# Altium footprint library conn.PcbLib: 101 footprints (part 2 of 7)
Each footprint in its own frame and in the unit in brackets; x right, y up, seen from the top. Pads: shape width x height; smd on the part's side, far side on the other; paste and mask are expansions set on the pad; w line width, h text height; cw(c..) or ccw(c..) is an arc to the next point about the centre after c.
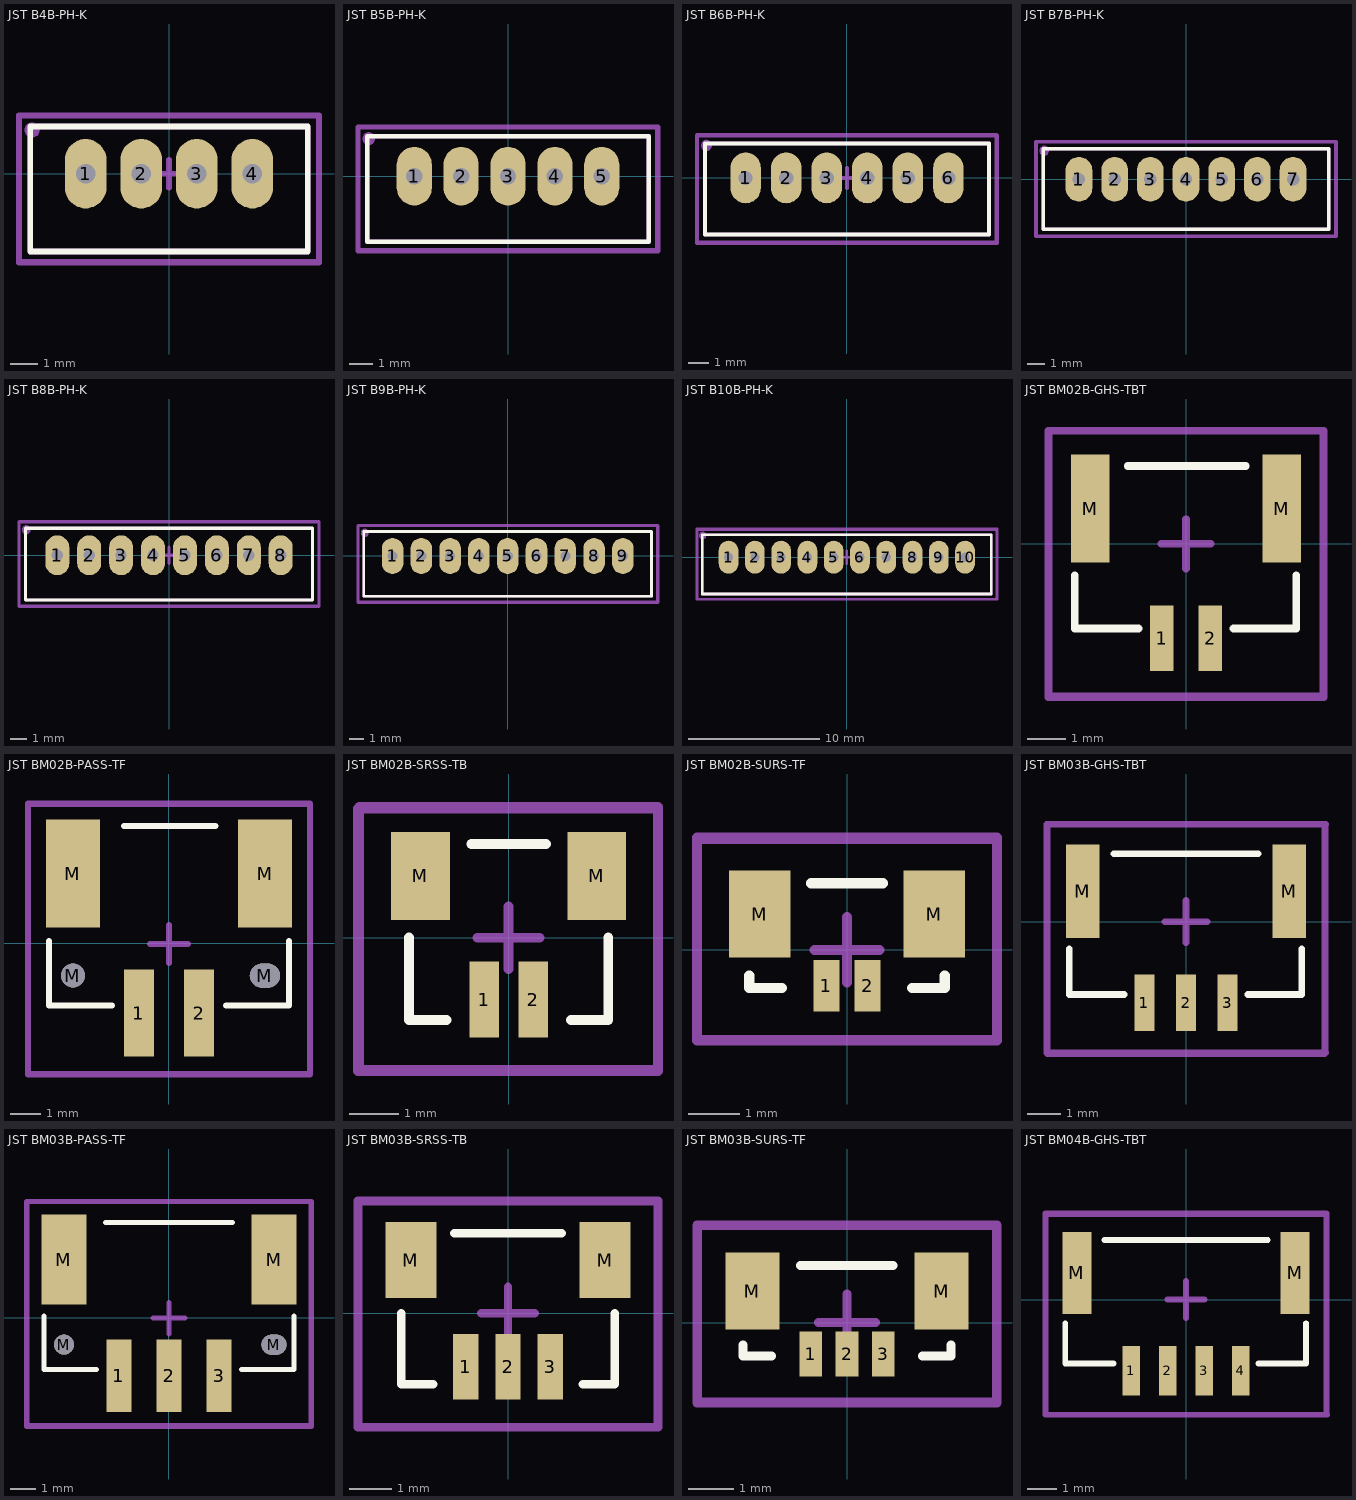
[diagram p1: the footprints below, top view; thin cyan lines are the x and y axes]

## JST B4B-PH-K [mm]
height 6
pads (4):
  oval 1.5x2.5 hole 0.7: 1(-3,0) 2(-1,0) 3(1,0) 4(3,0)
Top Overlay:
  lines w0.2: -5,-2.8 -5,1.7 5,1.7 5,-2.8 -5,-2.8
Bottom Overlay:
  circle w0.254: c-4.1,1.1 r0.141
Mechanical 13:
  lines w0.2: -5,-2.8 5,-2.8 5,1.7 -5,1.7 -5,-2.8
Top Component:
  circle w0.051: c-4.928,1.575 r0.25
  region: -4.928,1.325 -4.977,1.325 -5.069,1.363 -5.14,1.433 -5.178,1.525 -5.178,1.575 -5.178,1.625 -5.14,1.717 -5.069,1.787 -4.977,1.825 -4.928,1.825 -4.878,1.825 -4.786,1.787 -4.716,1.717 -4.677,1.625 -4.677,1.575 -4.677,1.525 -4.716,1.433 -4.786,1.363 -4.878,1.325
  lines w0.203: -5.385,-3.175 -5.385,2.083 5.385,2.083 5.385,-3.175 -5.385,-3.175
  text ".Designator" at -0.813,-0.559 h2.03
Component Center:
  lines w0.2: -0.5,0 0.5,0 ; 0,-0.5 0,0.5 ; -5.4,-3.2 -5.4,2.1 5.4,2.1 5.4,-3.2 -5.4,-3.2
3D body "JST B4B-PH-K-S.STEP": height 6, standoff -3.4, extent -4.95,-2.8 4.95,1.7

## JST B5B-PH-K [mm]
height 6
pads (5):
  oval 1.5x2.5 hole 0.7: 1(-4,0) 2(-2,0) 3(0,0) 4(2,0) 5(4,0)
Top Overlay:
  lines w0.2: -6,-2.8 -6,1.7 6,1.7 6,-2.8 -6,-2.8
Bottom Overlay:
  circle w0.254: c-5.1,1.1 r0.141
Mechanical 13:
  lines w0.2: -6,-2.8 6,-2.8 6,1.7 -6,1.7 -6,-2.8
Top Component:
  circle w0.051: c-5.944,1.6 r0.25
  region: -5.944,1.35 -5.993,1.35 -6.085,1.388 -6.156,1.458 -6.194,1.55 -6.194,1.6 -6.194,1.65 -6.156,1.742 -6.085,1.812 -5.993,1.85 -5.944,1.85 -5.894,1.85 -5.802,1.812 -5.732,1.742 -5.693,1.65 -5.693,1.6 -5.693,1.55 -5.732,1.458 -5.802,1.388 -5.894,1.35
  lines w0.203: -6.401,-3.175 -6.401,2.108 6.375,2.108 6.375,-3.175 -6.401,-3.175
  text ".Designator" at -0.813,-0.584 h2.03
Component Center:
  lines w0.2: -0.5,0 0.5,0 ; 0,-0.5 0,0.5 ; -6.4,-3.2 -6.4,2.1 6.4,2.1 6.4,-3.2 -6.4,-3.2
3D body "JST B5B-PH-K-S.STEP": height 6, standoff -3.4, extent -5.95,-2.8 5.95,1.7

## JST B6B-PH-K [mm]
height 6
pads (6):
  oval 1.5x2.5 hole 0.7: 1(-5,0) 2(-3,0) 3(-1,0) 4(1,0) 5(3,0) 6(5,0)
Top Overlay:
  lines w0.2: -7,-2.8 7,-2.8 7,1.7 -7,1.7 -7,-2.8
Bottom Overlay:
  circle w0.254: c-6.1,1.1 r0.141
Mechanical 13:
  lines w0.2: 6.95,-2.8 -7,-2.8 -7,1.7 7,1.7 7,-2.8
Top Component:
  circle w0.051: c-6.934,1.6 r0.25
  region: -6.934,1.35 -6.984,1.35 -7.076,1.388 -7.146,1.458 -7.184,1.55 -7.184,1.6 -7.184,1.65 -7.146,1.742 -7.076,1.812 -6.984,1.85 -6.934,1.85 -6.884,1.85 -6.792,1.812 -6.722,1.742 -6.684,1.65 -6.684,1.6 -6.684,1.55 -6.722,1.458 -6.792,1.388 -6.884,1.35
  lines w0.203: -7.391,-3.2 -7.391,2.108 7.366,2.108 7.366,-3.2 -7.391,-3.2
  text ".Designator" at -0.813,-0.559 h2.03
Component Center:
  lines w0.2: -0.5,0 0.5,0 ; 0,-0.5 0,0.5 ; -7.4,-3.2 -7.4,2.1 7.4,2.1 7.4,-3.2 -7.4,-3.2
3D body "JST B6B-PH-K-S.STEP": height 6, standoff -3.4, extent -6.95,-2.8 6.95,1.7

## JST B7B-PH-K [mm]
height 6
pads (7):
  oval 1.5x2.5 hole 0.7: 1(-6,0) 2(-4,0) 3(-2,0) 4(0,0) 5(2,0) 6(4,0) 7(6,0)
Top Overlay:
  lines w0.2: -8,-2.8 -8,1.7 8,1.7 8,-2.8 -8,-2.8
Bottom Overlay:
  circle w0.254: c-7.1,1.1 r0.141
Mechanical 13:
  lines w0.2: -8,-2.8 8,-2.8 8,1.7 -8,1.7 -8,-2.8
Top Component:
  circle w0.051: c-7.95,1.6 r0.25
  region: -7.95,1.35 -8,1.35 -8.092,1.388 -8.162,1.458 -8.2,1.55 -8.2,1.6 -8.2,1.65 -8.162,1.742 -8.092,1.812 -8,1.85 -7.95,1.85 -7.9,1.85 -7.808,1.812 -7.738,1.742 -7.7,1.65 -7.7,1.6 -7.7,1.55 -7.738,1.458 -7.808,1.388 -7.9,1.35
  lines w0.203: -8.407,-3.2 8.407,-3.2 8.407,2.108 -8.407,2.108 -8.407,-3.2
  text ".Designator" at -0.813,-0.584 h2.03
Component Center:
  lines w0.2: -0.5,0 0.5,0 ; 0,-0.5 0,0.5 ; -8.4,-3.2 8.4,-3.2 8.4,2.1 -8.4,2.1 -8.4,-3.2
3D body "JST B7B-PH-K-S.STEP": height 6, standoff -3.4, extent -7.95,-2.8 7.95,1.7

## JST B8B-PH-K [mm]
height 6
pads (8):
  oval 1.5x2.5 hole 0.7: 1(-7,0) 2(-5,0) 3(-3,0) 4(-1,0) 5(1,0) 6(3,0) 7(5,0) 8(7,0)
Top Overlay:
  lines w0.2: -9,-2.8 9,-2.8 9,1.7 -9,1.7 -9,-2.8
Bottom Overlay:
  circle w0.254: c-8.1,1.1 r0.141
Mechanical 13:
  lines w0.2: 8.95,1.7 -9,1.7 -9,-2.8 9,-2.8 9,1.7
Top Component:
  circle w0.051: c-8.941,1.6 r0.25
  region: -8.941,1.35 -8.991,1.35 -9.083,1.388 -9.153,1.458 -9.191,1.55 -9.191,1.6 -9.191,1.65 -9.153,1.742 -9.083,1.812 -8.991,1.85 -8.941,1.85 -8.891,1.85 -8.799,1.812 -8.729,1.742 -8.691,1.65 -8.691,1.6 -8.691,1.55 -8.729,1.458 -8.799,1.388 -8.891,1.35
  lines w0.203: -9.398,-3.2 9.398,-3.2 9.398,2.108 -9.398,2.108 -9.398,-3.2
  text ".Designator" at -0.813,-0.559 h2.03
Component Center:
  lines w0.2: -0.5,0 0.5,0 ; 0,-0.5 0,0.5 ; -9.4,-3.2 9.4,-3.2 9.4,2.1 -9.4,2.1 -9.4,-3.2
3D body "JST B8B-PH-K-S.STEP": height 6, standoff -3.4, extent -8.95,-2.8 8.95,1.7

## JST B9B-PH-K [mm]
height 6
pads (9):
  oval 1.5x2.5 hole 0.7: 1(-8,0) 2(-6,0) 3(-4,0) 4(-2,0) 5(0,0) 6(2,0) 7(4,0) 8(6,0) 9(8,0)
Top Overlay:
  lines w0.2: -10,-2.8 -10,1.7 10,1.7 10,-2.8 -10,-2.8
Bottom Overlay:
  circle w0.254: c-9.1,1.1 r0.141
Mechanical 13:
  lines w0.2: -10,-2.8 10,-2.8 10,1.7 -10,1.7 -10,-2.8
Top Component:
  circle w0.051: c-9.931,1.6 r0.25
  region: -9.931,1.35 -9.981,1.35 -10.073,1.388 -10.143,1.458 -10.182,1.55 -10.182,1.6 -10.182,1.65 -10.143,1.742 -10.073,1.812 -9.981,1.85 -9.931,1.85 -9.882,1.85 -9.79,1.812 -9.719,1.742 -9.681,1.65 -9.681,1.6 -9.681,1.55 -9.719,1.458 -9.79,1.388 -9.882,1.35
  lines w0.203: -10.389,-3.226 -10.389,2.108 10.439,2.108 10.439,-3.226 -10.389,-3.226
  text ".Designator" at -0.813,-0.559 h2.03
Component Center:
  lines w0.2: -0.5,0 0.5,0 ; 0,-0.5 0,0.5 ; -10.4,-3.2 10.4,-3.2 10.4,2.1 -10.4,2.1 -10.4,-3.2
3D body "JST B9B-PH-K-S.STEP": height 6, standoff -3.4, extent -9.95,-2.8 9.95,1.7

## JST B10B-PH-K [mm]
height 6
pads (10):
  oval 1.5x2.5 hole 0.7: 1(-9,0) 2(-7,0) 3(-5,0) 4(-3,0) 5(-1,0) 6(1,0) 7(3,0) 8(5,0) 9(7,0) 10(9,0)
Top Overlay:
  lines w0.2: -11,-2.8 -11,1.7 11,1.7 11,-2.8 -11,-2.8
Bottom Overlay:
  circle w0.254: c-10.1,1.1 r0.141
Mechanical 13:
  lines w0.2: 10.95,-2.8 -11,-2.8 -11,1.7 11,1.7 11,-2.8
Top Component:
  circle w0.051: c-10.973,1.651 r0.25
  region: -10.973,1.401 -11.023,1.401 -11.115,1.439 -11.185,1.509 -11.223,1.601 -11.223,1.651 -11.223,1.701 -11.185,1.793 -11.115,1.863 -11.023,1.901 -10.973,1.901 -10.923,1.901 -10.831,1.863 -10.761,1.793 -10.723,1.701 -10.723,1.651 -10.723,1.601 -10.761,1.509 -10.831,1.439 -10.923,1.401
  lines w0.203: -11.405,-3.2 11.43,-3.2 11.43,2.159 -11.405,2.159 -11.405,-3.2
  text ".Designator" at -0.813,-0.559 h2.03
Component Center:
  lines w0.2: -0.5,0 0.5,0 ; 0,-0.5 0,0.5 ; -11.4,-3.2 -11.4,2.1 11.4,2.1 11.4,-3.2 -11.4,-3.2
3D body "JST B10B-PH-K-S.STEP": height 6, standoff -3.4, extent -10.95,-2.8 10.95,1.7

## JST BM02B-GHS-TBT [mm] "JST GH Series 1.25mm pitch, 4 pin top entry connector"
height 4.5
pads (4):
  rect 0.6x1.7 smd: 1(-0.625,-2.437) 2(0.625,-2.437)
  rect 1x2.8 smd: M(-2.475,0.913) M(2.475,0.913)
Top Overlay:
  lines w0.2: -2.875,-0.812 -2.875,-2.187 -1.225,-2.187 ; -1.504,2.008 1.544,2.008 ; 1.225,-2.187 2.85,-2.187 2.85,-0.812
Top Component:
  lines w0.203: -3.556,-3.962 3.556,-3.962 3.556,2.921 -3.556,2.921 -3.556,-3.962
  text ".Designator" at -0.813,-0.559 h2.03
Component Center:
  lines w0.2: -0.635,0 0.635,0 ; 0,-0.635 0,0.635 ; -3.556,-3.937 -3.556,2.921 3.556,2.921 3.556,-3.937 -3.556,-3.937
3D body "JST BM02B-GHS-TBT.STEP": height 4.18, standoff -0.03, extent -2.875,-2.987 2.875,1.963

## JST BM02B-PASS-TF [mm] "JST PA Series 2mm pitch, top entry connector"
height 11.1
pads (6):
  rect 1x2.9 smd: 1(-1,-2.325) 2(1,-2.325)
  round 0.8 hole 0.8 unplated mask+0.102: M(-3.2,-1.075)
  rect 1.8x3.6 smd: M(-3.2,2.325) M(3.2,2.325)
  oval 1x0.8 hole 0.8 slot 1 at 0 deg unplated mask+0.102: M(3.2,-1.075)
Top Overlay:
  lines w0.2: -4,0.075 -4,-2.075 -1.905,-2.075 ; -1.504,3.92 1.544,3.92 ; 1.905,-2.075 4,-2.075 4,0.075
Top Component:
  lines w0.203: -4.699,-4.369 -4.699,4.648 4.699,4.648 4.699,-4.369 -4.699,-4.369
  text ".Designator" at -0.813,-0.559 h2.03
Component Center:
  lines w0.2: -0.635,-0.015 0.635,-0.015 ; 0,-0.65 0,0.62 ; -4.699,-4.357 -4.699,4.66 4.699,4.66 4.699,-4.357 -4.699,-4.357
3D body "JST BM02B-PASS-TF.STEP": height 9, standoff 0, extent -4,-3.225 4,3.875

## JST BM02B-SRSS-TB [mm] "1.0mm pitch/Disconnectable Crimp style connector"
height 2.95
pads (4):
  rect 0.6x1.55 smd: 1(-0.5,-1.262) 2(0.5,-1.262)
  rect 1.2x1.8 smd: M(-1.8,1.262) M(1.8,1.262)
Top Overlay:
  lines w0.2: -2.032,0.008 -2.032,-1.676 -1.27,-1.676 ; -0.762,1.913 0.762,1.913 ; 1.27,-1.676 2.032,-1.676 2.032,0.008
Top Component:
  lines w0.203: -3.073,-2.718 3.048,-2.718 3.048,2.642 -3.073,2.642 -3.073,-2.718
  text ".Designator" at -0.813,-0.559 h2.03
Component Center:
  lines w0.2: -0.635,0 0.635,0 ; 0,-0.635 0,0.635 ; -3.048,-2.692 -3.048,2.667 3.048,2.667 3.048,-2.692 -3.048,-2.692
3D body "JST BM02B-SRSS-TB.STEP": height 4.32, standoff 0, extent -2,-1.687 2,1.913

## JST BM02B-SURS-TF [mm] "1.0mm pitch/Disconnectable Crimp style connector"
height 3.95
pads (4):
  rect 0.5x1 smd: 1(-0.4,-0.7) 2(0.4,-0.7)
  rect 1.2x1.7 smd: M(-1.7,0.7) M(1.7,0.7)
Top Overlay:
  lines w0.2: -1.905,-0.5 -1.905,-0.741 -1.27,-0.741 ; -0.7,1.3 0.7,1.3 ; 1.27,-0.741 1.905,-0.741 1.905,-0.5
Top Component:
  lines w0.203: -2.921,-1.753 -2.921,2.184 2.921,2.184 2.921,-1.753 -2.921,-1.753
  text ".Designator" at -0.813,-0.559 h2.03
Component Center:
  lines w0.2: -0.635,0 0.635,0 ; 0,-0.635 0,0.635 ; -2.921,-1.757 -2.921,2.159 2.921,2.159 2.921,-1.757 -2.921,-1.757
3D body "JST BM02B-SURS-TF.STEP": height 2.75, standoff 0, extent -1.9,-0.995 1.9,1.255

## JST BM03B-GHS-TBT [mm] "JST GH Series 1.25mm pitch, 4 pin top entry connector"
height 4.5
pads (5):
  rect 0.6x1.7 smd: 1(-1.25,-2.437) 2(0,-2.437) 3(1.25,-2.437)
  rect 1x2.8 smd: M(-3.1,0.913) M(3.1,0.913)
Top Overlay:
  lines w0.2: -3.5,-0.812 -3.5,-2.187 -1.85,-2.187 ; -2.159,2.032 2.159,2.032 ; 1.85,-2.187 3.475,-2.187 3.475,-0.812
Top Component:
  lines w0.203: -4.166,-3.962 4.166,-3.962 4.166,2.921 -4.166,2.921 -4.166,-3.962
  text ".Designator" at -0.813,-0.559 h2.03
Component Center:
  lines w0.2: -0.635,0 0.635,0 ; 0,-0.635 0,0.635 ; 4.181,-3.937 4.181,2.921 ; 4.191,-3.937 -4.181,-3.937 -4.181,2.921 4.191,2.921
3D body "JST BM03B-GHS-TBT.STEP": height 4.18, standoff -0.03, extent -3.5,-2.918 3.5,2.032

## JST BM03B-PASS-TF [mm] "JST PA Series 2mm pitch, top entry connector"
height 11.1
pads (7):
  rect 1x2.9 smd: 1(-2,-2.325) 2(0,-2.325) 3(2,-2.325)
  round 0.8 hole 0.8 unplated mask+0.102: M(-4.2,-1.075)
  rect 1.8x3.6 smd: M(-4.2,2.325) M(4.2,2.325)
  oval 1x0.8 hole 0.8 slot 1 at 0 deg unplated mask+0.102: M(4.2,-1.075)
Top Overlay:
  lines w0.2: -5,0.075 -5,-2.075 -2.905,-2.075 ; -2.54,3.81 2.54,3.81 ; 2.905,-2.075 5,-2.075 5,0.075
Top Component:
  lines w0.203: -5.69,-4.318 -5.69,4.648 5.69,4.648 5.69,-4.318 -5.69,-4.318
  text ".Designator" at -0.813,-0.559 h2.03
Component Center:
  lines w0.2: -0.635,-0.015 0.635,-0.015 ; 0,-0.65 0,0.62 ; -5.699,-4.357 -5.699,4.66 5.699,4.66 5.699,-4.357 -5.699,-4.357
3D body "JST BM03B-PASS-TF.STEP": height 9, standoff 0, extent -5,-3.225 5,3.875

## JST BM03B-SRSS-TB [mm] "1.0mm pitch/Disconnectable Crimp style connector"
height 2.95
pads (5):
  rect 0.6x1.55 smd: 1(-1,-1.262) 2(0,-1.262) 3(1,-1.262)
  rect 1.2x1.8 smd: M(-2.3,1.262) M(2.3,1.262)
Top Overlay:
  lines w0.2: -2.532,0.008 -2.532,-1.676 -1.77,-1.676 ; -1.27,1.905 1.27,1.905 ; 1.77,-1.676 2.532,-1.676 2.532,0.008
Top Component:
  lines w0.203: -3.556,-2.692 -3.556,2.667 3.556,2.667 3.556,-2.692 -3.556,-2.692
  text ".Designator" at -0.813,-0.533 h2.03
Component Center:
  lines w0.2: -0.635,0 0.635,0 ; 0,-0.635 0,0.635 ; -3.548,-2.692 -3.548,2.667 3.548,2.667 3.548,-2.692 -3.548,-2.692
3D body "JST BM03B-SRSS-TB.STEP": height 4.32, standoff 0, extent -2.5,-1.688 2.5,1.912

## JST BM03B-SURS-TF [mm] "1.0mm pitch/Disconnectable Crimp style connector"
height 3.95
pads (5):
  rect 0.5x1 smd: 1(-0.8,-0.7) 2(0,-0.7) 3(0.8,-0.7)
  rect 1.2x1.7 smd: M(-2.1,0.7) M(2.1,0.7)
Top Overlay:
  lines w0.2: -2.305,-0.5 -2.305,-0.741 -1.67,-0.741 ; -1.035,1.27 1.016,1.27 ; 1.67,-0.741 2.305,-0.741 2.305,-0.5
Top Component:
  lines w0.203: -3.327,-1.778 -3.327,2.159 3.327,2.159 3.327,-1.778 -3.327,-1.778
  text ".Designator" at -0.813,-0.559 h2.03
Component Center:
  lines w0.2: -0.635,0 0.635,0 ; 0,-0.635 0,0.635 ; -3.321,-1.757 3.321,-1.757 3.321,2.159 -3.321,2.159 -3.321,-1.757
3D body "JST BM03B-SURS-TF.STEP": height 2.75, standoff 0, extent -2.3,-1.016 2.3,1.234

## JST BM04B-GHS-TBT [mm] "JST GH Series 1.25mm pitch, top entry connector"
height 4.5
pads (6):
  rect 0.6x1.7 smd: 1(-1.875,-2.437) 2(-0.625,-2.437) 3(0.625,-2.437) 4(1.875,-2.437)
  rect 1x2.8 smd: M(-3.725,0.913) M(3.725,0.913)
Top Overlay:
  lines w0.2: -4.125,-0.812 -4.125,-2.187 -2.475,-2.187 ; -2.784,2.032 2.794,2.032 ; 2.475,-2.187 4.1,-2.187 4.1,-0.812
Top Component:
  lines w0.203: -4.801,-3.937 -4.801,2.946 4.801,2.946 4.801,-3.937 -4.801,-3.937
  text ".Designator" at -0.813,-0.559 h2.03
Component Center:
  lines w0.2: -0.635,0 0.635,0 ; 0,-0.635 0,0.635 ; 4.806,-3.937 4.806,2.921 -4.806,2.921 -4.806,-3.937 4.826,-3.937
3D body "JST BM04B-GHS-TBT.STEP": height 4.18, standoff -0.03, extent -4.125,-2.918 4.125,2.032